# Altium footprint library 0251003.NRT1L.PcbLib: 1 footprints
Each footprint in its own frame and in the unit in brackets; x right, y up, seen from the top. Pads: shape width x height; smd on the part's side, far side on the other; paste and mask are expansions set on the pad; w line width, h text height; cw(c..) or ccw(c..) is an arc to the next point about the centre after c.
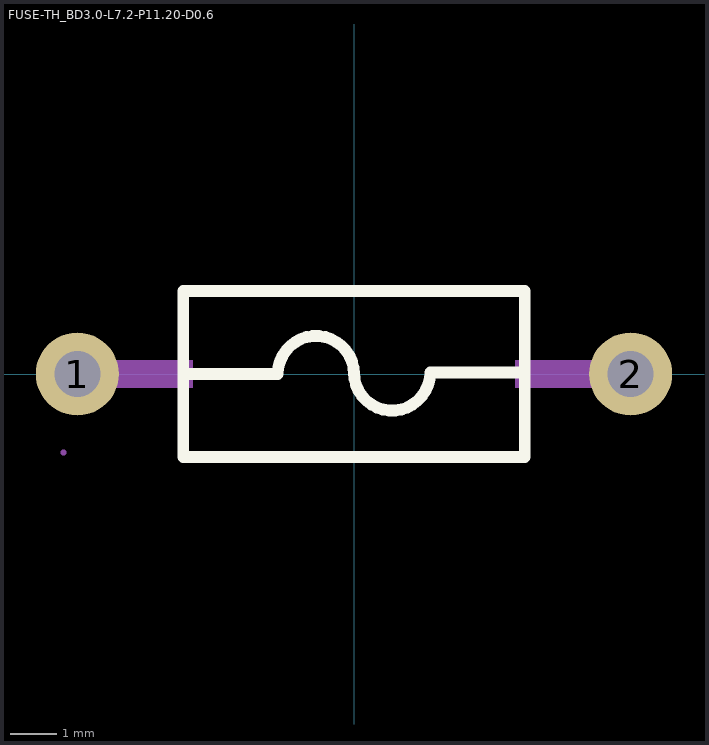
[diagram p0: the footprint, top view; thin cyan lines are the x and y axes]

## FUSE-TH_BD3.0-L7.2-P11.20-D0.6 [mm]
pads (2):
  round 1.8 hole 1: 1(-6,0) 2(6,0)
Top Overlay:
  lines w0.254: -3.556,0 -1.651,0 cw(c-0.826,0) 0,0 ; 0,0.032 ccw(c0.826,0.032) 1.651,0.032 3.556,0.032 ; -3.7,-1.8 3.7,-1.8 3.7,1.8 -3.7,1.8 -3.7,-1.8
Mechanical 6:
  lines w0.051: -3.6,-1.7 -3.6,1.7 3.6,1.7 3.6,-1.7 -3.6,-1.7
Mechanical 7:
  region: 6.3,-0.3 6.3,0.3 3.5,0.3 3.5,-0.3
  region: -6.3,0.3 -6.3,-0.3 -3.5,-0.3 -3.5,0.3
Mechanical 8:
  region: -6.24,-1.7 -6.24,-1.725 -6.275,-1.76 -6.325,-1.76 -6.36,-1.725 -6.36,-1.7 -6.36,-1.675 -6.325,-1.64 -6.275,-1.64 -6.24,-1.675 -6.24,-1.7
Mechanical 9:
  region: -5.7,0 -5.7,-0.06 -5.746,-0.17 -5.83,-0.254 -5.94,-0.3 -6.06,-0.3 -6.17,-0.254 -6.254,-0.17 -6.3,-0.06 -6.3,0 -6.3,0.06 -6.254,0.17 -6.17,0.254 -6.06,0.3 -5.94,0.3 -5.83,0.254 -5.746,0.17 -5.7,0.06 -5.7,0
  region: 6.3,0 6.3,-0.06 6.254,-0.17 6.17,-0.254 6.06,-0.3 5.94,-0.3 5.83,-0.254 5.746,-0.17 5.7,-0.06 5.7,0 5.7,0.06 5.746,0.17 5.83,0.254 5.94,0.3 6.06,0.3 6.17,0.254 6.254,0.17 6.3,0.06 6.3,0